# Altium footprint library PcbLib1.PcbLib: 1 footprints
Each footprint in its own frame and in the unit in brackets; x right, y up, seen from the top. Pads: shape width x height; smd on the part's side, far side on the other; paste and mask are expansions set on the pad; w line width, h text height; cw(c..) or ccw(c..) is an arc to the next point about the centre after c.
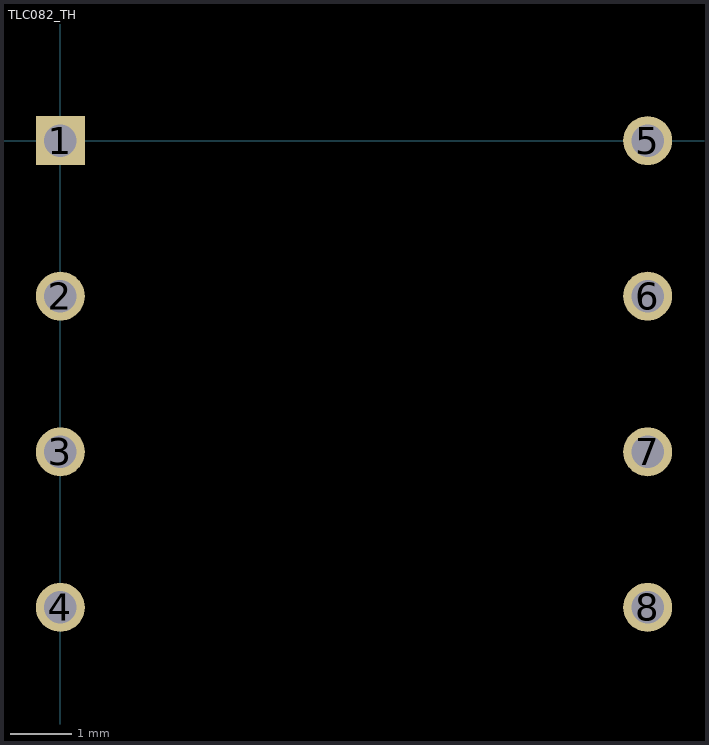
[diagram p0: the footprint, top view; thin cyan lines are the x and y axes]

## TLC082_TH [mm] "Footprint only for TLC082"
pads (8):
  rect 0.8x0.8 hole 0.53: 1(0,0)
  round 0.8 hole 0.53: 2(0,-2.54) 3(0,-5.08) 4(0,-7.62) 5(9.59,0) 6(9.59,-2.54) 7(9.59,-5.08) 8(9.59,-7.62)